# Altium footprint library FootPrintLib_0.PcbLib: 266 footprints (part 6 of 17)
Each footprint in its own frame and in the unit in brackets; x right, y up, seen from the top. Pads: shape width x height; smd on the part's side, far side on the other; paste and mask are expansions set on the pad; w line width, h text height; cw(c..) or ccw(c..) is an arc to the next point about the centre after c.
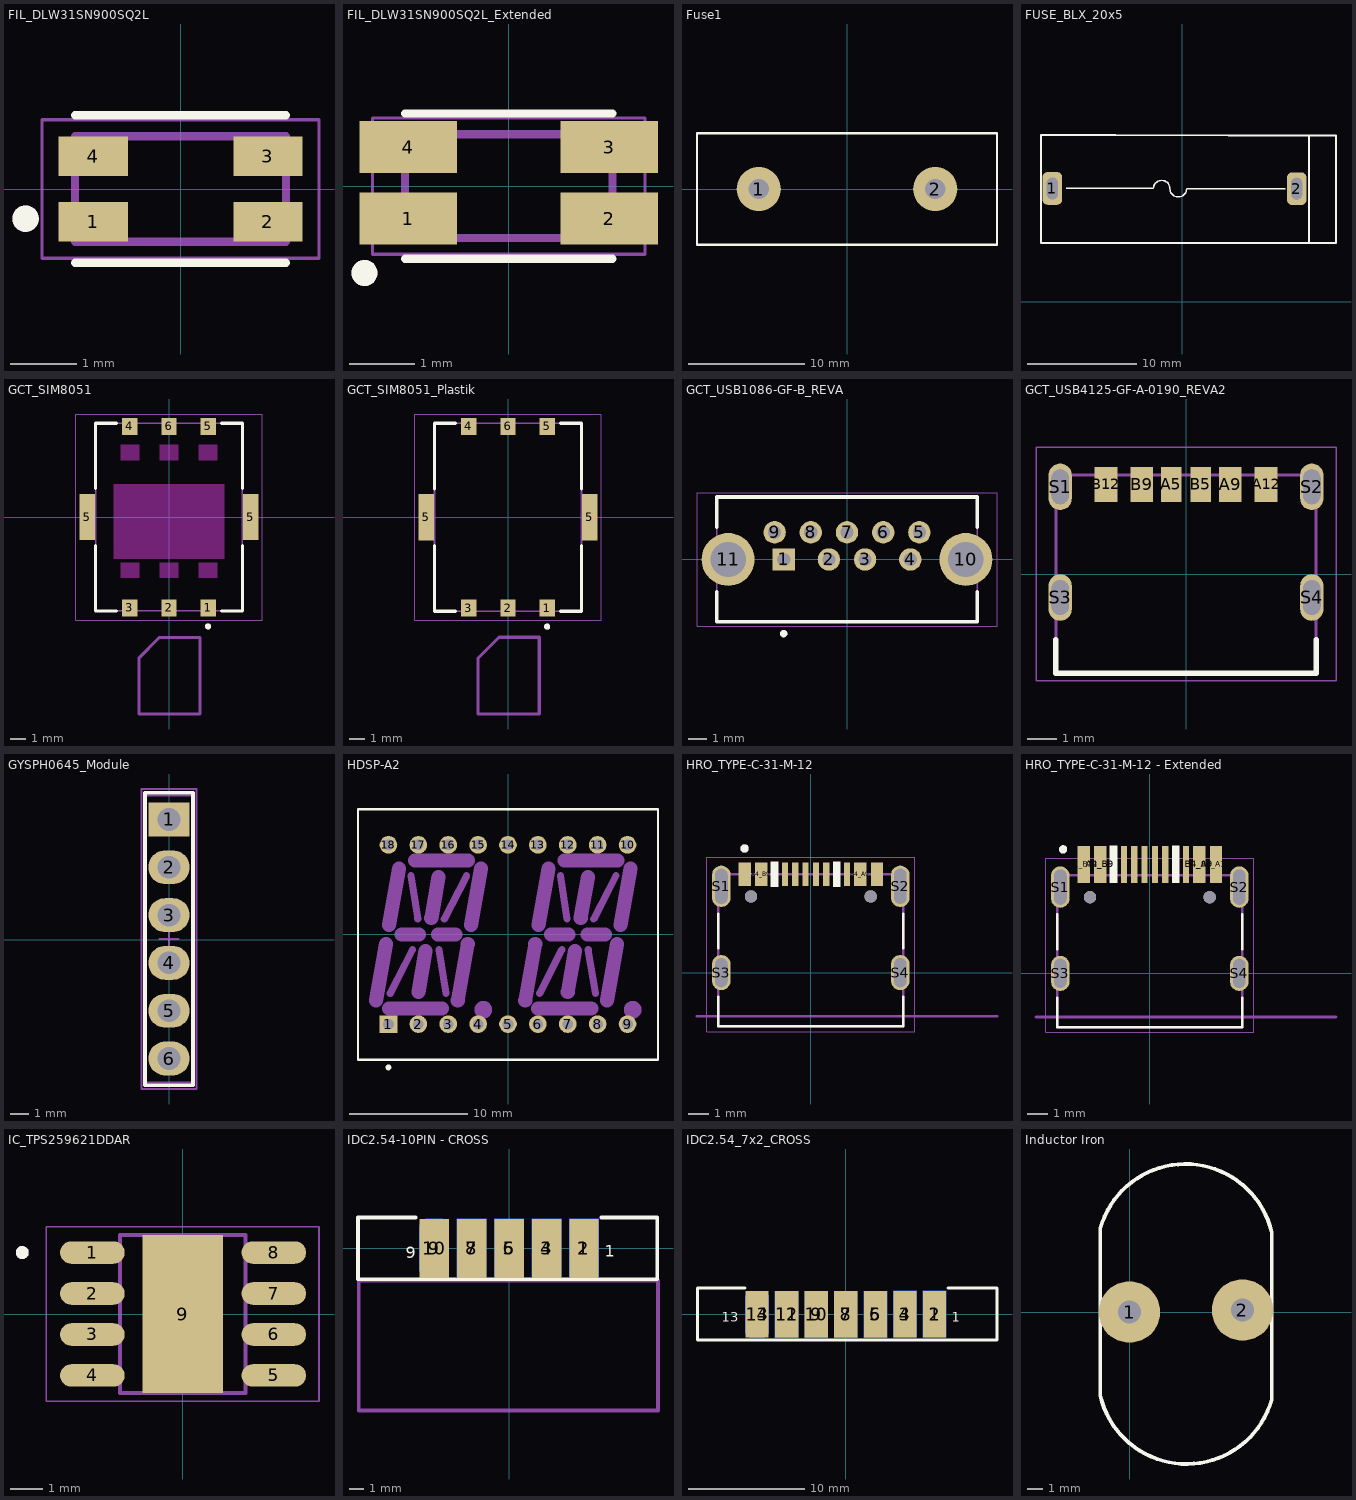
[diagram p5: the footprints below, top view; thin cyan lines are the x and y axes]

## FIL_DLW31SN900SQ2L [mm]
pads (4):
  rect 1.05x0.6 smd: 1(-1.325,-0.5) 2(1.325,-0.5) 3(1.325,0.5) 4(-1.325,0.5)
Top Overlay:
  circle w0.2: c-2.35,-0.45 r0.1
  lines w0.127: -1.6,-1.12 1.6,-1.12 ; -1.6,1.12 1.6,1.12
Mechanical 13:
  circle w0.2: c-2.35,-0.45 r0.1
  lines w0.127: -1.6,-0.8 1.6,-0.8 1.6,0.8 -1.6,0.8 -1.6,-0.8
Mechanical 15:
  lines w0.05: -2.1,-1.05 -2.1,1.05 2.1,1.05 2.1,-1.05 -2.1,-1.05
3D body "DLW31SN900SQ2L--3DModel-STEP-1.STEP": height 2.1, standoff 0, extent -1.575,-0.8 1.625,0.8

## FIL_DLW31SN900SQ2L_Extended [mm]
pads (4):
  rect 1.5x0.8 smd: 1(-1.55,-0.5) 2(1.55,-0.5) 3(1.55,0.6) 4(-1.55,0.6)
Top Overlay:
  circle w0.2: c-2.223,-1.339 r0.1
  lines w0.127: -1.6,-1.12 1.6,-1.12 ; -1.6,1.12 1.6,1.12
Mechanical 13:
  circle w0.2: c-2.223,-1.339 r0.1
  lines w0.127: -1.6,-0.8 -1.6,0.8 1.6,0.8 1.6,-0.8 -1.6,-0.8
Mechanical 15:
  lines w0.05: -2.1,-1.05 2.1,-1.05 2.1,1.05 -2.1,1.05 -2.1,-1.05
3D body "DLW31SN900SQ2L--3DModel-STEP-1.STEP": height 2.1, standoff 0, extent -1.575,-0.8 1.625,0.8

## Fuse1 [mm] "Fuse Box with Door"
pads (2):
  round 3.81 hole 1.75: 1(-7.62,0) 2(7.62,0)
Top Overlay:
  lines w0.203: -12.954,-4.826 12.954,-4.826 12.954,4.826 -12.954,4.826 -12.954,-4.826

## FUSE_BLX_20x5 [mm]
pads (2):
  rrect50% 1.8x3 hole 1 slot 2 at 90 deg: 1(-11.938,10.414) 2(10.49,10.389)
Top Overlay:
  lines w0.127: -10.643,10.42 -2.666,10.42 ; -2.666,10.42 cw(c-1.905,10.389) -1.143,10.389 ccw(c-0.381,10.389) 0.381,10.389 9.423,10.389
  lines w0.2: 11.608,5.436 11.608,15.265 ; -12.979,5.41 -12.979,15.316 -6.164,15.316 4.224,15.283 4.229,15.288 14.097,15.288 14.097,5.41 -12.979,5.41
3D body "User Library-Fuse Holder-5.step": height 13.6, standoff -4.2, extent -12.903,5.338 14.097,15.338

## GCT_SIM8051 [mm]
height 1.35
pads (8):
  rect 1x1.1 smd: 1(2.54,-5.9) 2(0,-5.9) 3(-2.54,-5.9) 4(-2.54,5.9) 5(2.54,5.9) 6(0,5.9)
  rect 1x3 smd: 5(-5.3,0) 5(5.3,0)
Top Overlay:
  circle w0.2: c2.54,-7.1 r0.1
  lines w0.2: -4.77,-1.85 -4.77,-6.1 -3.4,-6.1 ; -4.77,1.85 -4.77,6.1 -3.4,6.1 ; 3.4,-6.1 4.77,-6.1 4.77,-1.85 ; 3.4,6.1 4.77,6.1 4.77,1.85
Keep-Out Layer:
  region: 3.575,-2.7 -3.575,-2.7 -3.575,2.15 3.575,2.15
  region: -1.94,-3.95 -3.14,-3.95 -3.14,-2.95 -1.94,-2.95
  region: 3.14,-3.95 1.94,-3.95 1.94,-2.95 3.14,-2.95
  region: -1.94,3.7 -3.14,3.7 -3.14,4.7 -1.94,4.7
  region: 0.6,3.7 -0.6,3.7 -0.6,4.7 0.6,4.7
  region: 0.6,-3.95 -0.6,-3.95 -0.6,-2.95 0.6,-2.95
  region: 3.14,3.7 1.94,3.7 1.94,4.7 3.14,4.7
Mechanical 5:
  lines w0.2: -1.961,-12.795 -1.961,-9.162 -0.614,-7.816 2.002,-7.816 2.002,-12.795 -1.961,-12.795
  text "↑" at -0.559,-12.116 h4
Mechanical 13:
  circle w0.2: c2.54,-7.1 r0.1
  lines w0.1: -4.77,-6.1 4.77,-6.1 4.77,6.1 -4.77,6.1 -4.77,-6.1
Mechanical 15:
  lines w0.05: -6.05,-6.7 6.05,-6.7 6.05,6.7 -6.05,6.7 -6.05,-6.7
3D body "step_temp.STEP": height 1.35, standoff 0, extent -5.4,-6.1 5.4,6.1

## GCT_SIM8051_Plastik [mm]
height 1.35
pads (8):
  rect 1x1.1 smd: 1(2.54,-5.9) 2(0,-5.9) 3(-2.54,-5.9) 4(-2.54,5.9) 5(2.54,5.9) 6(0,5.9)
  rect 1x3 smd: 5(-5.3,0) 5(5.3,0)
Top Overlay:
  circle w0.2: c2.54,-7.1 r0.1
  lines w0.2: -4.77,-1.85 -4.77,-6.1 -3.4,-6.1 ; -4.77,1.85 -4.77,6.1 -3.4,6.1 ; 3.4,-6.1 4.77,-6.1 4.77,-1.85 ; 3.4,6.1 4.77,6.1 4.77,1.85
Mechanical 5:
  lines w0.2: -1.935,-12.769 2.027,-12.769 2.027,-7.791 -0.589,-7.791 -1.935,-9.137 -1.935,-12.769
  text "↑" at -0.533,-12.09 h4
Mechanical 13:
  circle w0.2: c2.54,-7.1 r0.1
  lines w0.1: -4.77,-6.1 -4.77,6.1 4.77,6.1 4.77,-6.1 -4.77,-6.1
Mechanical 15:
  lines w0.05: -6.05,-6.7 -6.05,6.7 6.05,6.7 6.05,-6.7 -6.05,-6.7
3D body "step_temp.STEP": height 1.35, standoff 0, extent -5.4,-6.1 5.4,6.1

## GCT_USB1086-GF-B_REVA [mm]
pads (11):
  rect 1.238x1.238 hole 0.73: 1(-3.5,0)
  round 1.238 hole 0.73: 2(-1,0) 3(1,0) 4(3.5,0) 5(4,1.5) 6(2,1.5) 7(0,1.5) 8(-2,1.5) 9(-4,1.5)
  round 2.925 hole 1.95: 10(6.57,0) 11(-6.57,0)
Top Overlay:
  circle w0.2: c-3.5,-4.1 r0.1
  lines w0.2: -7.2,-1.78 -7.2,-3.45 7.2,-3.45 7.2,-1.78 ; -7.2,1.78 -7.2,3.45 7.2,3.45 7.2,1.78
Mechanical 13:
  circle w0.2: c-3.5,-4.1 r0.1
  lines w0.1: -7.2,-3.45 7.2,-3.45 7.2,3.45 -7.2,3.45 -7.2,-3.45
Mechanical 15:
  lines w0.05: -8.29,-3.7 8.29,-3.7 8.29,3.7 -8.29,3.7 -8.29,-3.7
3D body "usb1086-gf-b_reva.step": height 15.05, standoff -3.85, extent -7.65,-3.429 7.65,3.471

## GCT_USB4125-GF-A-0190_REVA2 [mm]
pads (10):
  rect 0.7x1.2 smd: A5(-0.5,3.08) B5(0.5,3.08)
  rect 0.76x1.2 smd: A9(1.52,3.08) B9(-1.52,3.08)
  rect 0.8x1.2 smd: A12(2.75,3.08) B12(-2.75,3.08)
  oval 0.8x1.6 hole 0.6 slot 1.2 at 90 deg mask+0: S1(-4.32,3) S2(4.32,3) S3(-4.32,-0.8) S4(4.32,-0.8)
Top Overlay:
  lines w0.2: -4.47,-2.25 -4.47,-3.4 4.47,-3.4 4.47,-2.25
Top Solder:
  drawing of 4 lines, arcs and shapes, not listed
Bottom Solder:
  drawing of 4 lines, arcs and shapes, not listed
Mechanical 13:
  lines w0.1: -4.47,-3.4 -4.47,3.4 4.47,3.4 4.47,-3.4 -4.47,-3.4
Mechanical 15:
  lines w0.05: -5.15,-3.65 -5.15,4.35 5.15,4.35 5.15,-3.65 -5.15,-3.65
3D body "USB Connector Type C female 6pin.STEP": height 3.3, standoff -0.92, extent -4.445,-3.416 4.495,3.454

## GYSPH0645_Module [mm] "20 Hz ~ 10 kHz Digital, I2S Microphone MEMS (Silicon) 1.62 V ~ 3.6 V Omnidirectional (-26dB ±3dB @ 94dB SPL) Solder Pads"
height 8.54
pads (6):
  rect 2.2x1.8 hole 1.2: 1(-0.025,6.401)
  oval 2.2x1.8 hole 1.2: 2(-0.025,3.861) 3(-0.025,1.321) 4(-0.025,-1.219) 5(-0.025,-3.759) 6(-0.025,-6.299)
Top Overlay:
  lines w0.2: -1.295,-7.719 -1.295,7.821 1.245,7.821 1.245,-7.719 -1.295,-7.719
Mechanical 11:
  lines w0.1: -1.295,-7.569 1.245,-7.569 1.245,7.671 -1.295,7.671 -1.295,-7.569
Mechanical 13:
  lines w0.1: -1.295,-7.719 -1.295,7.821 1.245,7.821 1.245,-7.719 -1.295,-7.719
Mechanical 15:
  lines w0.1: -0.525,0.051 0.475,0.051 ; -0.025,-0.449 -0.025,0.551 ; -1.495,-7.919 -1.495,8.021 1.445,8.021 1.445,-7.919 -1.495,-7.919
3D body "61300611121.stp": height 8.57, standoff -2.97, extent -1.295,-7.569 1.245,7.671
3D body "User Library-Adafruit I2S Mic SPK0415HM4H.STEP": height 8.49, standoff 7, extent -10.236,-8.306 2.464,8.204

## HDSP-A2 [mm] "LED, Alphanumeric Display, 13.8 mm, Dual Character; 18 Leads; Row Space 15.24 mm; Pitch 2.54 mm"
height 7.27
pads (18):
  rect 1.5x1.5 hole 0.9: 1(-10.16,-7.62)
  round 1.5 hole 0.9: 2(-7.62,-7.62) 3(-5.08,-7.62) 4(-2.54,-7.62) 5(0,-7.62) 6(2.54,-7.62) 7(5.08,-7.62) 8(7.62,-7.62) 9(10.16,-7.62) 10(10.16,7.62) 11(7.62,7.62) 12(5.08,7.62) 13(2.54,7.62) 14(0,7.62) 15(-2.54,7.62) 16(-5.08,7.62) 17(-7.62,7.62) 18(-10.16,7.62)
Top Overlay:
  circle w0.25: c-10.16,-11.3 r0.125
  lines w0.2: -12.75,-10.65 -12.75,10.65 12.75,10.65 12.75,-10.65 -12.75,-10.65
Mechanical 1:
  circle w1.2: c10.6,-6.4 r0.15
  circle w1.2: c-2.1,-6.4 r0.15
  lines w0.6: -10.01,-5 -8.12,-1.3 ; -8.25,5 -7.67,1.3 ; -5.88,-1.3 -5.28,-5 ; -5.42,1.3 -3.52,5 ; 2.69,-5 4.58,-1.3 ; 4.45,5 5.03,1.3 ; 6.82,-1.3 7.42,-5 ; 7.28,1.3 9.18,5
  lines w1.2: -11.23,-5.6 -10.38,-0.8 ; -10.13,-6.3 -5.62,-6.3 ; -10.1,0.8 -9.26,5.58 ; -9.035,0 -7.58,0 ; -7.9,6.3 -3.39,6.3 ; -7.62,-4.89 -7.01,-1.4 ; -6.52,1.41 -5.91,4.89 ; -5.96,0 -4.465,0 ; -4.27,-5.6 -3.42,-0.8 ; -3.13,0.81 -2.3,5.59 ; 1.47,-5.6 2.32,-0.8 ; 2.57,-6.3 7.08,-6.3 ; 2.6,0.8 3.44,5.58 ; 3.665,0 5.14,0 ; 4.8,6.3 9.31,6.3 ; 5.08,-4.89 5.69,-1.4 ; 6.18,1.41 6.79,4.89 ; 6.76,0 8.235,0 ; 8.43,-5.6 9.28,-0.8 ; 9.57,0.81 10.4,5.59
Mechanical 13:
  lines w0.1: -12.75,-10.65 12.75,-10.65 12.75,10.65 -12.75,10.65 -12.75,-10.65
3D body "14segment.SLDPRT": height 7.8, standoff -4.6, extent -12.603,-10.397 12.497,10.803

## HRO_TYPE-C-31-M-12 [mm]
height 3.26
pads (16):
  rect 0.6x1.14 smd mask+0.05: A1_B12(-3.2,4.75) A4_B9(-2.4,4.75) B1_A12(3.2,4.75) B4_A9(2.4,4.75)
  rect 0.3x1.14 smd mask+0.05: A5(-1.25,4.75) A6(-0.25,4.75) A7(0.25,4.75) B5(1.75,4.75) B6(0.75,4.75) B7(-0.75,4.75)
  oval 0.9x2 hole 0.6 slot 1.7 at 90 deg: S1(-4.325,4.17) S2(4.325,4.17)
  oval 0.9x1.7 hole 0.6 slot 1.4 at 90 deg: S3(-4.325,0) S4(4.325,0)
  round 0.6 hole 0.6 unplated: ""(-2.89,3.68) ""(2.89,3.68)
Top Overlay:
  circle w0.2: c-3.2,6 r0.1
  rectangle: -1.956,4.14 -1.549,5.359
  rectangle: 1.067,4.14 1.448,5.359
  lines w0.127: -4.47,-1.17 -4.47,-2.6 4.47,-2.6 4.47,-1.17 ; -4.47,1.17 -4.47,2.85 ; 4.47,1.17 4.47,2.85
Mechanical 13:
  circle w0.2: c-3.2,6 r0.1
  lines w0.127: -5.5,-2.11 9,-2.11 ; -4.47,-2.6 -4.47,4.75 4.47,4.75 4.47,-2.6 -4.47,-2.6
  text "PCB EDGE" at 4.699,-1.981 h0.61
Mechanical 15:
  lines w0.05: -5.025,-2.85 5.025,-2.85 5.025,5.57 -5.025,5.57 -5.025,-2.85
3D body "step_temp.STEP": height 3.31, standoff -0.99, extent -4.47,-2.6 4.47,5.305

## HRO_TYPE-C-31-M-12 - Extended [mm]
height 3.26
pads (16):
  rect 0.6x1.8 smd mask+0.05: A1_B12(-3.2,5.264) A4_B9(-2.4,5.264) B1_A12(3.2,5.264) B4_A9(2.4,5.264)
  rect 0.3x1.8 smd mask+0.05: A5(-1.25,5.264) A6(-0.25,5.264) A7(0.25,5.264) B5(1.75,5.264) B6(0.75,5.264) B7(-0.75,5.264)
  oval 0.9x2 hole 0.6 slot 1.7 at 90 deg: S1(-4.325,4.17) S2(4.325,4.17)
  oval 0.9x1.7 hole 0.6 slot 1.4 at 90 deg: S3(-4.325,0) S4(4.325,0)
  round 0.6 hole 0.6 unplated: ""(-2.89,3.68) ""(2.89,3.68)
Top Overlay:
  circle w0.2: c-4.191,5.994 r0.1
  rectangle: -1.956,4.369 -1.549,6.172
  rectangle: 1.067,4.369 1.448,6.172
  lines w0.127: -4.47,-1.17 -4.47,-2.6 4.47,-2.6 4.47,-1.17 ; -4.47,1.17 -4.47,2.85 ; 4.47,1.17 4.47,2.85
Mechanical 13:
  lines w0.127: -5.5,-2.11 9,-2.11 ; -4.47,-2.6 -4.47,4.75 4.47,4.75 4.47,-2.6 -4.47,-2.6
  text "PCB EDGE" at 4.699,-1.981 h0.61
Mechanical 15:
  lines w0.05: -5.025,-2.85 5.025,-2.85 5.025,5.57 -5.025,5.57 -5.025,-2.85
3D body "step_temp.STEP": height 3.31, standoff -0.99, extent -4.47,-2.6 4.47,5.305

## IC_TPS259621DDAR [mm]
pads (9):
  oval 2x0.7 smd: 1(-2.8,1.905) 2(-2.8,0.635) 3(-2.8,-0.635) 4(-2.8,-1.905) 5(2.825,-1.905) 6(2.825,-0.635) 7(2.825,0.635) 8(2.825,1.905)
  rect 2.5x4.9 smd paste-3 mask+0: 9(0,0)
Top Overlay:
  circle w0.2: c-4.975,1.905 r0.1
Top Solder:
  rectangle: -1.016,1.397 -0.127,2.159
  rectangle: 0.127,1.397 1.016,2.159
  rectangle: -1.016,0.212 -0.127,0.974
  rectangle: 0.127,0.254 1.016,1.016
  rectangle: -1.016,-0.974 -0.127,-0.212
  rectangle: 0.127,-1.016 1.016,-0.254
  rectangle: -1.016,-2.159 -0.127,-1.397
  rectangle: 0.127,-2.159 1.016,-1.397
Mechanical 13:
  circle w0.2: c-4.975,1.905 r0.1
  lines w0.127: -1.95,-2.45 -1.95,2.45 1.95,2.45 1.95,-2.45 -1.95,-2.45
Mechanical 15:
  lines w0.05: -4.225,-2.7 -4.225,2.7 4.225,2.7 4.225,-2.7 -4.225,-2.7
3D body "step_temp.STEP": height 1.7, standoff 0, extent -3,-2.45 3,2.45

## IDC2.54-10PIN - CROSS [mm]
height 9.45
pads (10):
  rect 2x4 smd: 1(5.08,0) 3(2.54,0) 5(0,0) 7(-2.54,0) 9(-5.08,0)
  rect 2x4 smd far side: 2(5.08,0) 4(2.54,0) 6(0,0) 8(-2.54,0)
  rrect50% 2x4 smd far side: 10(-5.08,0)
Top Overlay:
  lines w0.254: -6.351,2.1 -10.251,2.1 -10.251,-2.1 10.049,-2.1 10.049,2.1 6.249,2.1
  text "1" at 6.5,-0.57 h0.8
  text "9" at -7,-0.67 h0.8
Bottom Overlay:
  lines w0.254: -6.3,2.1 -10.2,2.1 -10.2,-2.1 10.1,-2.1 10.1,2.1 6.3,2.1
  text "2" at 7.3,-0.57 h0.8
  text "10" at -6.6,-0.67 h0.8
Mechanical 13:
  lines w0.254: -10.2,-11 -10.2,-2.17 -10.1,-2.17 10.1,-2.17 10.1,-11 -10.2,-11
3D body "User Library-IDC Socket Male 10pin Straight THT Goldplated 2_54mm.STEP": height 3.38, standoff -5.47, extent -10.343,-11.026 9.957,1.374

## IDC2.54_7x2_CROSS [mm]
height 9.45
pads (14):
  rect 2x4 smd: 1(7.62,0.013) 3(5.08,0.013) 5(2.54,-0.013) 7(0,-0.013) 9(-2.54,-0.013) 11(-5.08,-0.013) 13(-7.62,-0.013)
  rect 2x4 smd far side: 2(7.62,0.013) 4(5.08,0.013) 6(2.54,-0.013) 8(0,-0.013) 10(-2.54,-0.013) 12(-5.08,-0.013)
  rrect50% 2x4 smd far side: 14(-7.62,-0.013)
Top Overlay:
  lines w0.254: -8.636,2.273 -12.725,2.273 -12.725,-2.222 12.979,-2.222 12.979,2.273 8.788,2.273
  text "13" at -10.668,-0.66 h0.8
  text "1" at 9.093,-0.648 h0.8
Bottom Overlay:
  lines w0.254: -8.687,2.273 -12.776,2.273 -12.776,-2.222 12.929,-2.222 12.929,2.273 8.738,2.273
  text "14" at -9.14,-0.683 h0.8
  text "2" at 9.55,-0.686 h0.8
3D body "61201421621.stp": height 4.43, standoff -4.75, extent -12.644,-10.579 12.796,1.521

## Inductor Iron [mm]
pads (2):
  round 4 hole 1.5: 1(0,0) 2(7.366,0.127)
Top Overlay:
  lines w0.25: -1.905,-5.461 -1.905,5.461 ; 9.271,-5.715 9.271,5.207
  lines w0.254: -1.905,-5.461 ccw(c3.716,-4.13) 9.271,-5.715 ; -1.905,5.461 cw(c3.65,3.876) 9.271,5.207
3D body "User Library-5701-RC.STEP": height 28.03, standoff -7, extent -1.977,-11.21 9.343,11.21